# Altium PCB Lab.PcbLib
Units mm, origin at the board's own origin, x right, y up, seen from the top; angles counter-clockwise.
Board outline not stored, 2 copper layers (Top, Bottom), stack 0 mm thick; 4 components, 0 nets, 12 pads, 0 vias.
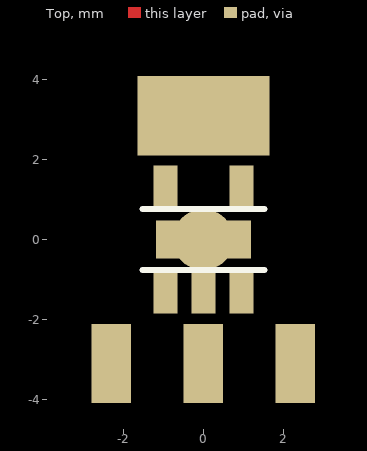
[diagram p0: Top view]
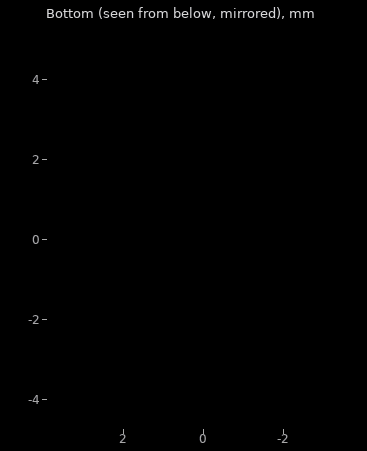
[diagram p1: Bottom view, seen from below]

## Layer stack, top to bottom

## Components (designator, comment, footprint, x,y, rotation, side; value= is the part's Value field where it differs from the comment)
? "" SOT23-5 0,0 r0 top
? "" R0603 0,0 r0 top
? "" SOT223 0,0 r0 top
? "" TESTPAD 0,0 r0 top

## Footprints (in the part's own frame and the unit in brackets; to place one, negate y for a bottom-side part, rotate by r counter-clockwise, add the part's x,y. Pads: shape width x height; smd on the part's side, far side on the other; paste and mask are expansions set on the pad)
R0603 [mil]
  rect 31.5x37.4 smd: 1(-31,0) 2(31,0)
SOT23-5 [mm]
  rect 0.599x1.1 smd: 1(-0.95,-1.3) 2(0,-1.3) 3(0.95,-1.3) 4(0.95,1.3) 5(-0.95,1.3)
  silkscreen extent -1.52,-0.76 1.52,0.76
SOT223 [mil]
  rect 39x78 smd: 1(-90.6,-122) 2(0,-122) 3(90.6,-122)
  rect 130x78 smd: 4(0,122)
TESTPAD [mil]
  round 60 smd: 1(0,0)

## Nets (pads, with @x,y where several pads share a name; then routed paths per layer and width w, separated by ;. In a path a pad name is that pad's centre, name@x,y a point inside that pad or via, vN(x,y) a via of type N, cw(c..) or ccw(c..) an arc to the next point about the centre after c; other vN are vias at no path point)
pads on no net: ?.1 ?.2 ?.3 ?.4 ?.5